# Altium schematic symbol library ESC Pad.SchLib: 1 symbol
Pins are listed as number, name and electrical type; pins without a type are passive.

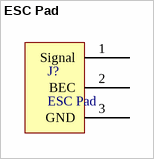
[diagram p0: symbol ESC Pad]

## ESC Pad
designator J?
pins: 1 Signal, 2 BEC, 3 GND